# Altium schematic symbol library Pump_Controller.SchLib: 5 symbols
Pins are listed as number, name and electrical type; pins without a type are passive.

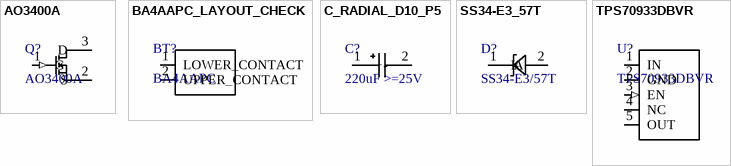
[diagram p0: symbols AO3400A to TPS70933DBVR]

## AO3400A
designator Q?
30V N-channel MOSFET; G=1 S=2 D=3; Manufacturer: Alpha & Omega Semiconductor; Do Not Substitute: Yes; Assembly Notes: 48mOhm max at VGS=2.5V; verify motor stall current and PCB thermal design.; Sourcing Status: LCSC catalog ID checked 2026-11-11; live stock not exposed; recheck before ordering; Verification Status: See validation report; Manufacturer Part Number: AO3400A; LCSC Part #: C20917; Footprint: TB_AOS_SOT23_PO00001M; Source: AOS AO3400A Rev 3.1 July 2023; SOT23 PO-00001 version M
footprint TB_AOS_SOT23_PO00001M (Verified source-linked PCB model; see Source and Assembly Notes parameters)
pins: 1 G (in), 2 S, 3 D

## BA4AAPC_LAYOUT_CHECK
designator BT?, comment BA4AAPC
4xAA PCB holder; layout model; terminal polarity requires sample check; Manufacturer: Memory Protection Devices, Inc.; Do Not Substitute: Yes; Assembly Notes: PCB layout orientation and physical terminal polarity must be confirmed against a sample before fabrication. Pins deliberately NOT named +/-.; Sourcing Status: LCSC catalog ID checked 2026-11-11; live stock not exposed; recheck before ordering; Verification Status: Layout only - polarity/sample check required; Manufacturer Part Number: BA4AAPC; LCSC Part #: C6748055; Footprint: TB_MPD_BA4AAPC_REVH; Source: MPD BA4AAPC drawing Rev H 03/06/19 PCB LAYOUT
footprint TB_MPD_BA4AAPC_REVH (Verified source-linked PCB model; see Source and Assembly Notes parameters)
pins: 1 LOWER_CONTACT, 2 UPPER_CONTACT

## C_RADIAL_D10_P5
designator C?, comment 220uF >=25V
Generic polarized radial capacitor; D<=10mm P=5mm H<=20mm; 220uF >=25V target; Do Not Substitute: No - envelope constrained; Assembly Notes: Source 220uF >=25V, 5mm lead spacing, <=10mm diameter, <=20mm height, leads <=0.6mm. Check leakage for battery life.; Sourcing Status: Lab sourced; verify body and pitch; Verification Status: See validation report; Footprint: TB_CAP_RADIAL_D10_P5; Source: User-selected lab sourcing envelope; custom radial land pattern, not manufacturer-specific
footprint TB_CAP_RADIAL_D10_P5 (Verified source-linked PCB model; see Source and Assembly Notes parameters)
pins: 1 +, 2 -

## SS34-E3_57T
designator D?, comment SS34-E3/57T
40V 3A Schottky flyback diode; SMC DO-214AB; Manufacturer: Vishay General Semiconductor; Do Not Substitute: Yes; Assembly Notes: Pad 1 is cathode (band), connected to pump positive. Not an SMA footprint.; Sourcing Status: LCSC catalog ID checked 2026-11-11; live stock not exposed; recheck before ordering; Verification Status: See validation report; Manufacturer Part Number: SS34-E3/57T; LCSC Part #: C13354; Footprint: TB_VISHAY_SMC_SS34; Source: Vishay document 88751 Rev 23-Apr-2020 page 3
footprint TB_VISHAY_SMC_SS34 (Verified source-linked PCB model; see Source and Assembly Notes parameters)
pins: 1 K, 2 A

## TPS70933DBVR
designator U?
3.3V 150mA 30V low-Iq LDO; DBV non-A/B pinout; Manufacturer: Texas Instruments; Do Not Substitute: Yes; Assembly Notes: EN may float for always-on; do not connect EN directly to 12V.; Sourcing Status: LCSC catalog ID checked 2026-11-11; live stock not exposed; recheck before ordering; Verification Status: See validation report; Manufacturer Part Number: TPS70933DBVR; LCSC Part #: C89347; Footprint: TB_TPS709_DBV0005A; Source: TI TPS709 Rev H; DBV0005A drawing 4214839/K 08/2024
footprint TB_TPS709_DBV0005A (Verified source-linked PCB model; see Source and Assembly Notes parameters)
pins: 1 IN (power), 2 GND (power), 3 EN (in), 4 NC, 5 OUT (power)